# Altium footprint library SYNCBOX_V3I1.PcbLib: 251 footprints (part 13 of 16)
Each footprint in its own frame and in the unit in brackets; x right, y up, seen from the top. Pads: shape width x height; smd on the part's side, far side on the other; paste and mask are expansions set on the pad; w line width, h text height; cw(c..) or ccw(c..) is an arc to the next point about the centre after c.
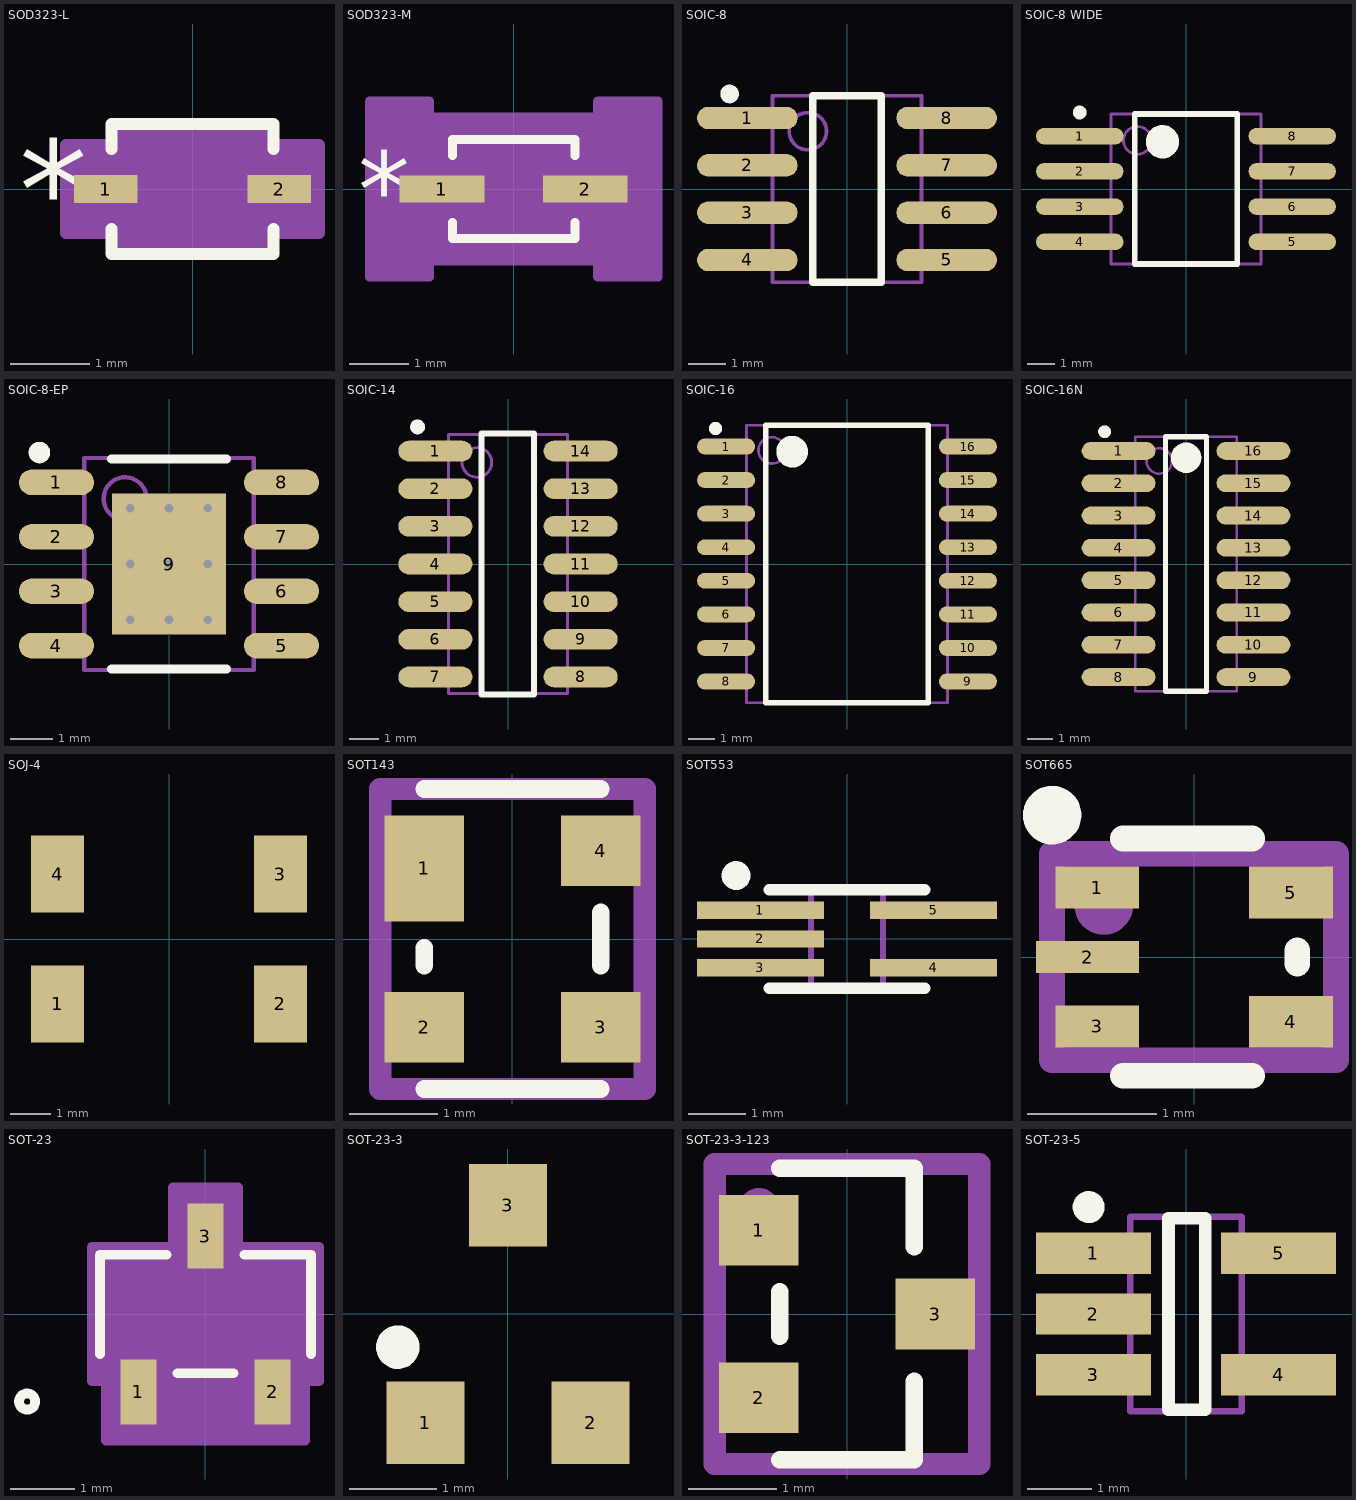
[diagram p12: the footprints below, top view; thin cyan lines are the x and y axes]

## SOD323-L [mm]
pads (2):
  rect 0.806x0.35 smd paste+0 mask+0: 1(-1.099,0) 2(1.099,0)
Top Overlay:
  lines w0.152: -1.027,-0.508 -1.027,-0.827 1.027,-0.827 1.027,-0.508 ; -1.027,0.508 -1.027,0.827 1.027,0.827 1.027,0.508
  text "*" at -2.201,-0.635 h1.27
Mechanical 13:
  lines w0.025: -0.9,-0.35 -0.55,-0.7 ; -0.9,0.35 -0.55,0.7 ; -1.35,-0.175 -0.9,-0.175 -0.9,0.175 -1.35,0.175 -1.35,-0.175 ; -0.9,-0.7 -0.9,0.7 0.9,0.7 0.9,-0.7 -0.9,-0.7 ; 0.9,-0.175 1.35,-0.175 1.35,0.175 0.9,0.175 0.9,-0.175
  text "*" at -0.964,-0.635 h1.27
Mechanical 15:
  region: -1.002,-0.556 -1.604,-0.556 -1.604,0.556 -1.002,0.556 -1.002,0.802 1.002,0.802 1.002,0.556 1.604,0.556 1.604,-0.556 1.002,-0.556 1.002,-0.802 -1.002,-0.802
  lines w0.152: -1.604,-0.556 -1.002,-0.556 -1.002,-0.802 1.002,-0.802 1.002,-0.556 1.604,-0.556 1.604,0.556 1.002,0.556 1.002,0.802 -1.002,0.802 -1.002,0.556 -1.604,0.556 -1.604,-0.556
3D body "SOD323-L.stp": height 0.81, standoff 0, extent -1.35,-0.7 1.35,0.7
3D body: height 0.25, standoff 0, extent 0,0 0.254,0.254

## SOD323-M [mm]
pads (2):
  rect 1.416x0.452 smd paste+0 mask+0: 1(-1.201,0) 2(1.201,0)
Top Overlay:
  lines w0.152: -1.027,-0.559 -1.027,-0.827 1.027,-0.827 1.027,-0.559 ; -1.027,0.559 -1.027,0.827 1.027,0.827 1.027,0.559
  text "*" at -2.607,-0.635 h1.27
Mechanical 13:
  lines w0.025: -0.9,-0.35 -0.55,-0.7 ; -0.9,0.35 -0.55,0.7 ; -1.35,-0.175 -1.35,0.175 -0.9,0.175 -0.9,-0.175 -1.35,-0.175 ; -0.9,-0.7 0.9,-0.7 0.9,0.7 -0.9,0.7 -0.9,-0.7 ; 0.9,-0.175 0.9,0.175 1.35,0.175 1.35,-0.175 0.9,-0.175
  text "*" at -0.964,-0.635 h1.27
Mechanical 15:
  region: -1.408,-1.47 -2.417,-1.47 -2.417,1.47 -1.408,1.47 -1.408,1.208 1.408,1.208 1.408,1.47 2.417,1.47 2.417,-1.47 1.408,-1.47 1.408,-1.208 -1.408,-1.208
  lines w0.152: -2.417,-1.47 -2.417,1.47 -1.408,1.47 -1.408,1.208 1.408,1.208 1.408,1.47 2.417,1.47 2.417,-1.47 1.408,-1.47 1.408,-1.208 -1.408,-1.208 -1.408,-1.47 -2.417,-1.47
3D body: height 0.25, standoff 0, extent 0,0 0.254,0.254
3D body "SOD323-M.stp": height 0.81, standoff 0, extent -1.35,-0.7 1.35,0.7

## SOIC-8 [mm] "3.9 x 6.0 MM BODY, 1.27MM PITCH"
height 1.75
pads (8):
  oval 2.7x0.6 smd: 1(-2.675,1.905) 2(-2.675,0.635) 3(-2.675,-0.635) 4(-2.675,-1.905) 5(2.675,-1.905) 6(2.675,-0.635) 7(2.675,0.635) 8(2.675,1.905)
Top Overlay:
  circle w0.25: c-3.15,2.55 r0.125
  lines w0.2: -0.925,-2.5 0.925,-2.5 0.925,2.5 -0.925,2.5 -0.925,-2.5
Mechanical 13:
  circle w0.1: c-1.05,1.55 r0.5
  lines w0.1: -2,-2.5 2,-2.5 2,2.5 -2,2.5 -2,-2.5
3D body: height 1.75, standoff 0.1, extent -2,-2.5 2,2.5

## SOIC-8 WIDE [mm] "SOIC, 8-Leads, Body 5.4x5.4mm (max), Pitch 1.27mm, IPC Medium Density"
height 2.16
pads (8):
  oval 3.15x0.6 smd: 1(-3.825,1.905) 2(-3.825,0.635) 3(-3.825,-0.635) 4(-3.825,-1.905) 5(3.825,-1.905) 6(3.825,-0.635) 7(3.825,0.635) 8(3.825,1.905)
Top Overlay:
  circle w0.25: c-3.825,2.755 r0.125
  circle w0.6: c-0.85,1.7 r0.3
  lines w0.2: -1.85,-2.7 -1.85,2.7 1.85,2.7 1.85,-2.7 -1.85,-2.7
Mechanical 13:
  circle w0.1: c-1.75,1.75 r0.5
  lines w0.1: -2.7,-2.7 -2.7,2.7 2.7,2.7 2.7,-2.7 -2.7,-2.7
3D body: height 2.16, standoff 0.05, extent -2.7,-2.7 2.7,2.7

## SOIC-8-EP [mm]
height 1.5
pads (9):
  oval 1.75x0.6 smd: 1(-2.625,1.905) 2(-2.625,0.635) 3(-2.625,-0.635) 4(-2.625,-1.905) 5(2.625,-1.905) 6(2.625,-0.635) 7(2.625,0.635) 8(2.625,1.905)
  rect 2.66x3.3 smd: 9(0,0)
via 0.9,1.3 diameter 0.66 hole 0.2
via 0,-1.3 diameter 0.66 hole 0.2
via 0,0 diameter 0.66 hole 0.2
via 0,1.3 diameter 0.66 hole 0.2
via 0.9,-1.3 diameter 0.66 hole 0.2
via -0.9,-1.3 diameter 0.66 hole 0.2
via 0.9,0 diameter 0.66 hole 0.2
via -0.9,0 diameter 0.66 hole 0.2
via -0.9,1.3 diameter 0.66 hole 0.2
Top Overlay:
  circle w0.25: c-3.025,2.6 r0.125
  lines w0.2: -1.35,-2.45 1.35,-2.45 ; -1.35,2.45 1.35,2.45
Mechanical 13:
  circle w0.1: c-1.025,1.525 r0.5
  lines w0.1: -1.975,-2.475 1.975,-2.475 1.975,2.475 -1.975,2.475 -1.975,-2.475
3D body: height 1.5, standoff 0, extent -1.975,-2.475 1.975,2.475

## SOIC-14 [mm]
height 1.75
pads (14):
  oval 2.5x0.7 smd: 1(-2.45,3.81) 2(-2.45,2.54) 3(-2.45,1.27) 4(-2.45,0) 5(-2.45,-1.27) 6(-2.45,-2.54) 7(-2.45,-3.81) 8(2.45,-3.81) 9(2.45,-2.54) 10(2.45,-1.27) 11(2.45,0) 12(2.45,1.27) 13(2.45,2.54) 14(2.45,3.81)
Top Overlay:
  circle w0.25: c-3.05,4.625 r0.125
  lines w0.2: -0.9,-4.4 0.875,-4.4 0.875,4.4 -0.9,4.4 -0.9,-4.4
Mechanical 13:
  circle w0.1: c-1.05,3.425 r0.5
  lines w0.1: -2,-4.375 2,-4.375 2,4.375 -2,4.375 -2,-4.375
3D body: height 1.75, standoff 0.1, extent -2,-4.375 2,4.375

## SOIC-16 [mm]
height 2.65
pads (16):
  oval 2.2x0.6 smd: 1(-4.575,4.445) 2(-4.575,3.175) 3(-4.575,1.905) 4(-4.575,0.635) 5(-4.575,-0.635) 6(-4.575,-1.905) 7(-4.575,-3.175) 8(-4.575,-4.445) 9(4.575,-4.445) 10(4.575,-3.175) 11(4.575,-1.905) 12(4.575,-0.635) 13(4.575,0.635) 14(4.575,1.905) 15(4.575,3.175) 16(4.575,4.445)
Top Overlay:
  circle w0.6: c-2.075,4.25 r0.3
  circle w0.25: c-4.975,5.125 r0.125
  lines w0.2: -3.075,-5.25 3.075,-5.25 3.075,5.25 -3.075,5.25 -3.075,-5.25
Mechanical 13:
  circle w0.1: c-2.85,4.3 r0.5
  lines w0.1: -3.8,-5.25 3.8,-5.25 3.8,5.25 -3.8,5.25 -3.8,-5.25
3D body: height 2.65, standoff 0.1, extent -3.8,-5.25 3.8,5.25

## SOIC-16N [mm]
height 1.75
pads (16):
  oval 2.9x0.7 smd: 1(-2.65,4.445) 2(-2.65,3.175) 3(-2.65,1.905) 4(-2.65,0.635) 5(-2.65,-0.635) 6(-2.65,-1.905) 7(-2.65,-3.175) 8(-2.65,-4.445) 9(2.65,-4.445) 10(2.65,-3.175) 11(2.65,-1.905) 12(2.65,-0.635) 13(2.65,0.635) 14(2.65,1.905) 15(2.65,3.175) 16(2.65,4.445)
Top Overlay:
  circle w0.6: c0,4.175 r0.3
  circle w0.25: c-3.2,5.2 r0.125
  lines w0.2: -0.8,-5 -0.8,5 0.8,5 0.8,-5 -0.8,-5
Mechanical 13:
  circle w0.1: c-1.05,4.05 r0.5
  lines w0.1: -2,-5 -2,5 2,5 2,-5 -2,-5
3D body: height 1.75, standoff 0.1, extent -2,-5 2,5

## SOJ-4 [mm]
height 2.5
pads (4):
  rect 1.3x1.9 smd: 1(-2.75,-1.6) 2(2.75,-1.6) 3(2.75,1.6) 4(-2.75,1.6)
3D body: height 2.5, standoff 0, extent -4,-1.9 4,1.9

## SOT143 [mm]
pads (4):
  rect 0.9x1.2 smd: 1(-1,0.8)
  rect 0.9x0.8 smd: 2(-1,-1) 3(1,-1) 4(1,1)
Top Overlay:
  lines w0.2: -1,-1.7 1,-1.7 ; -1,-0.3 -1,-0.1 ; -1,1.7 1,1.7 ; 1,-0.3 1,0.3
Mechanical 16:
  circle w0.254: c-1,1.1 r0.1
  lines w0.254: -1.5,-1.7 -1.5,1.7 1.5,1.7 1.5,-1.7 -1.5,-1.7
Mechanical 29:
  text ".Designator" at 0.35,-0.5 h0.6
3D body: height 1, standoff 0, extent -1,-1.7 1,1.7

## SOT553 [mm]
height 0.62
pads (5):
  rect 2.2x0.3 smd mask+0.08: 1(-1.5,0.5) 2(-1.5,0) 3(-1.5,-0.5) 4(1.5,-0.5) 5(1.5,0.5)
Top Overlay:
  circle w0.25: c-1.925,1.1 r0.125
  lines w0.2: -1.35,-0.85 1.35,-0.85 ; -1.35,0.85 1.35,0.85
Mechanical 13:
  lines w0.1: -0.625,-0.85 0.625,-0.85 0.625,0.85 -0.625,0.85 -0.625,-0.85
3D body: height 0.62, standoff 0, extent -0.625,-0.85 0.625,0.85

## SOT665 [mm]
pads (5):
  rect 0.65x0.325 smd mask+0.05: 1(-0.75,0.538) 3(-0.75,-0.538)
  rect 0.8x0.25 smd mask+0.05: 2(-0.825,0)
  rect 0.65x0.4 smd mask+0.05: 4(0.75,-0.5) 5(0.75,0.5)
Top Overlay:
  circle w0.254: c-1.1,1.1 r0.1
  lines w0.2: -0.55,-0.92 0.45,-0.92 ; -0.55,0.92 0.45,0.92 ; 0.8,-0.05 0.8,0.05
Mechanical 16:
  circle w0.254: c-0.7,0.4 r0.1
  lines w0.2: -1.1,-0.8 -1.1,0.8 1.1,0.8 1.1,-0.8 -1.1,-0.8
Mechanical 29:
  text ".Designator" at 0,0.3 h0.4
3D body "SOT50P160X60-5.step": height 0.6, standoff 0, extent -0.8,-0.795 0.8,0.795

## SOT-23 [mil]
pads (3):
  rect 22x40 smd paste+0 mask+0: 1(-41.34,-48) 2(41.34,-48) 3(0,48)
Top Overlay:
  circle w6: c-110,-54 r5
  lines w6: -65,-24.64 -65,36.5 -24.1,36.5 ; -17.24,-36.5 17.24,-36.5 ; 24.1,36.5 65,36.5 65,-24.64
Mechanical 13:
  circle w0: c-50,-21.5 r5
  lines w1: -60,-31.5 60,-31.5 60,31.5 -60,31.5 -60,-31.5 ; -51.34,-54 -51.34,-31.5 -31.34,-31.5 -31.34,-54 -51.34,-54 ; -10,31.5 10,31.5 10,54 -10,54 -10,31.5 ; 31.34,-54 31.34,-31.5 51.34,-31.5 51.34,-54 31.34,-54
Mechanical 15:
  region: -70,-41.5 -70,41.5 -20,41.5 -20,78 20,78 20,41.5 70,41.5 70,-41.5 61.34,-41.5 61.34,-78 -61.34,-78 -61.34,-41.5
  region: 60,-31.5 -60,-31.5 -60,31.5 60,31.5
  lines w6: -70,-41.5 -70,41.5 -20,41.5 -20,78 20,78 20,41.5 70,41.5 70,-41.5 61.34,-41.5 61.34,-78 -61.34,-78 -61.34,-41.5 -70,-41.5
3D body "SOT-23_J.stp": height 39.53, standoff -0.83, extent -58.07,-48.91 58.07,48.91
3D body: height 10, standoff 0, extent 0,0 10,10

## SOT-23-3 [mm] "SOT-23; 3 Leads; Body 3.0 x 2.6 mm, inc. leads (LxW max)"
height 1.12
pads (3):
  rect 0.9x0.95 smd: 1(-0.95,-1.25) 2(0.95,-1.25) 3(0,1.25)
Top Overlay:
  circle w0.25: c-1.268,-0.381 r0.125
3D body "cdsot23-txxc_series.stp": height 1.03, standoff -0.03, extent -1.485,-1.201 1.435,1.099

## SOT-23-3-123 [mm]
pads (3):
  rect 0.9x0.8 smd: 1(-1,0.95) 2(-1,-0.95) 3(1,0)
Top Overlay:
  lines w0.2: -0.762,-1.651 0.762,-1.651 0.762,-0.762 ; -0.762,-0.254 -0.762,0.254 ; -0.762,1.651 0.762,1.651 0.762,0.762
Mechanical 16:
  circle w0.254: c-1,1.2 r0.1
  lines w0.254: -1.5,-1.7 -1.5,1.7 1.5,1.7 1.5,-1.7 -1.5,-1.7
Mechanical 29:
  text ".Designator" at 0.3,-0.7 h0.6
3D body: height 0.5, standoff 0, extent 0.762,-0.381 1.27,0.381
3D body: height 0.5, standoff 0, extent -1.27,-1.333 -0.762,-0.572
3D body: height 0.5, standoff 0, extent -1.27,0.572 -0.762,1.333
3D body: height 1.1, standoff 0, extent -0.762,-1.651 0.762,1.651

## SOT-23-5 [mm]
height 1.45
pads (5):
  rect 1.8x0.65 smd: 1(-1.45,0.95) 2(-1.45,0) 3(-1.45,-0.95) 4(1.45,-0.95) 5(1.45,0.95)
Top Overlay:
  circle w0.25: c-1.525,1.675 r0.125
  lines w0.2: -0.275,-1.5 0.3,-1.5 0.3,1.5 -0.275,1.5 -0.275,-1.5
Mechanical 13:
  lines w0.1: -0.875,-1.525 -0.875,1.525 0.875,1.525 0.875,-1.525 -0.875,-1.525
3D body: height 1.45, standoff 0, extent -0.875,-1.525 0.875,1.525